# Altium footprint library ADP32F03XQP80S-REV1.01.PcbLib: 6 footprints
Each footprint in its own frame and in the unit in brackets; x right, y up, seen from the top. Pads: shape width x height; smd on the part's side, far side on the other; paste and mask are expansions set on the pad; w line width, h text height; cw(c..) or ccw(c..) is an arc to the next point about the centre after c.
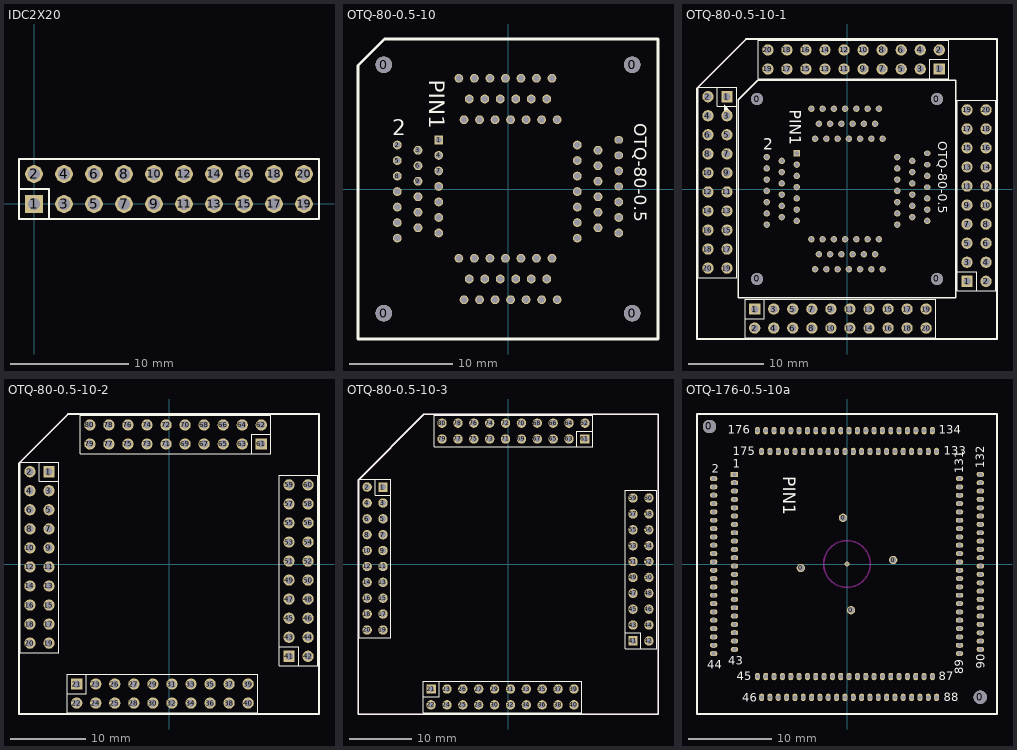
[diagram p0: the footprints below, top view; thin cyan lines are the x and y axes]

## IDC2X20 [mm] "2.54X40P双排插针"
pads (20):
  rect 1.5x1.5 hole 1: 1(0,0)
  round 1.5 hole 1: 2(0,2.54) 3(2.54,0) 4(2.54,2.54) 5(5.08,0) 6(5.08,2.54) 7(7.62,0) 8(7.62,2.54) 9(10.16,0) 10(10.16,2.54) 11(12.7,0) 12(12.7,2.54) 13(15.24,0) 14(15.24,2.54) 15(17.78,0) 16(17.78,2.54) 17(20.32,0) 18(20.32,2.54) 19(22.86,0) 20(22.86,2.54)
Top Overlay:
  lines w0.15: -1.27,1.27 1.27,1.27 1.27,-1.27 ; -1.27,-1.27 24.13,-1.27 24.13,3.81 -1.27,3.81 -1.27,-1.27

## OTQ-80-0.5-10 [mm]
height 0.9
pads (84):
  round 1.6 hole 1.6: 0(-12,-12) 0(-12,12) 0(12,-12) 0(12,12)
  rect 0.854x0.854 hole 0.6: 1(-6.7,4.75)
  round 0.854 hole 0.6: 2(-10.7,4.25) 3(-8.7,3.75) 4(-6.7,3.25) 5(-10.7,2.75) 6(-8.7,2.25) 7(-6.7,1.75) 8(-10.7,1.25) 9(-8.7,0.75) 10(-6.7,0.25) 11(-10.7,-0.25) 12(-8.7,-0.75) 13(-6.7,-1.25) 14(-10.7,-1.75) 15(-8.7,-2.25) 16(-6.7,-2.75) 17(-10.7,-3.25) 18(-8.7,-3.75) 19(-6.7,-4.25) 20(-10.7,-4.75) 21(-4.75,-6.7) 22(-4.25,-10.7) 23(-3.75,-8.7) 24(-3.25,-6.7) 25(-2.75,-10.7) 26(-2.25,-8.7) 27(-1.75,-6.7) 28(-1.25,-10.7) 29(-0.75,-8.7) 30(-0.25,-6.7) 31(0.25,-10.7) 32(0.75,-8.7) 33(1.25,-6.7) 34(1.75,-10.7) 35(2.25,-8.7) 36(2.75,-6.7) 37(3.25,-10.7) 38(3.75,-8.7) 39(4.25,-6.7) 40(4.75,-10.7) 41(6.7,-4.75) 42(10.7,-4.25) 43(8.7,-3.75) 44(6.7,-3.25) 45(10.7,-2.75) 46(8.7,-2.25) 47(6.7,-1.75) 48(10.7,-1.25) 49(8.7,-0.75) 50(6.7,-0.25) 52(8.7,0.75) 53(6.7,1.25) 54(10.7,1.75) 55(8.7,2.25) 56(6.7,2.75) 58(8.7,3.75) 59(6.7,4.25) 61(4.75,6.7) 62(4.25,10.7) 63(3.75,8.7) 64(3.25,6.7) 65(2.75,10.7) 66(2.25,8.7) 67(1.75,6.7) 68(1.25,10.7) 69(0.75,8.7) 70(0.25,6.7) 71(-0.25,10.7) 72(-0.75,8.7) 73(-1.25,6.7) 74(-1.75,10.7) 75(-2.25,8.7) 76(-2.75,6.7) 77(-3.25,10.7) 78(-3.75,8.7) 79(-4.25,6.7) 80(-4.75,10.7)
  oval 0.854x0.75 hole 0.6: 51(10.7,0.25) 57(10.7,3.25) 60(10.7,4.75)
Top Overlay:
  lines w0.254: -14.5,-14.5 -14.5,11.916 -11.916,14.5 14.5,14.5 14.5,-14.5 -14.5,-14.5
  text "OTQ-80-0.5" at 12.192,6.35 h1.2
  text "PIN1" at -7.62,10.541 h1.5
  text "2" at -11.176,5.207 h1.5

## OTQ-80-0.5-10-1 [mm]
height 0.9
pads (164):
  round 1.6 hole 1.6: 0(-12,-12) 0(-12,12) 0(12,-12) 0(12,12)
  rect 1.5x1.5 hole 1: 1(-16,12.308) 1(-12.308,-16) 1(12.308,16) 1(16,-12.308)
  rect 0.854x0.854 hole 0.6: 1(-6.7,4.75)
  round 1.5 hole 1: 2(-18.54,12.308) 2(-12.308,-18.54) 2(12.308,18.54) 2(18.54,-12.308) 3(-16,9.768) 3(-9.768,-16) 3(9.768,16) 3(16,-9.768) 4(-18.54,9.768) 4(-9.768,-18.54) 4(9.768,18.54) 4(18.54,-9.768) 5(-16,7.228) 5(-7.228,-16) 5(7.228,16) 5(16,-7.228) 6(-18.54,7.228) 6(-7.228,-18.54) 6(7.228,18.54) 6(18.54,-7.228) 7(-16,4.688) 7(-4.688,-16) 7(4.688,16) 7(16,-4.688) 8(-18.54,4.688) 8(-4.688,-18.54) 8(4.688,18.54) 8(18.54,-4.688) 9(-16,2.148) 9(-2.148,-16) 9(2.148,16) 9(16,-2.148) 10(-18.54,2.148) 10(-2.148,-18.54) 10(2.148,18.54) 10(18.54,-2.148) 11(-16,-0.392) 11(-0.392,16) 11(0.392,-16) 11(16,0.392) 12(-18.54,-0.392) 12(-0.392,18.54) 12(0.392,-18.54) 12(18.54,0.392) 13(-16,-2.932) 13(-2.932,16) 13(2.932,-16) 13(16,2.932) 14(-18.54,-2.932) 14(-2.932,18.54) 14(2.932,-18.54) 14(18.54,2.932) 15(-16,-5.472) 15(-5.472,16) 15(5.472,-16) 15(16,5.472) 16(-18.54,-5.472) 16(-5.472,18.54) 16(5.472,-18.54) 16(18.54,5.472) 17(-16,-8.012) 17(-8.012,16) 17(8.012,-16) 17(16,8.012) 18(-18.54,-8.012) 18(-8.012,18.54) 18(8.012,-18.54) 18(18.54,8.012) 19(-16,-10.552) 19(-10.552,16) 19(10.552,-16) 19(16,10.552) 20(-18.54,-10.552) 20(-10.552,18.54) 20(10.552,-18.54) 20(18.54,10.552)
  round 0.854 hole 0.6: 2(-10.7,4.25) 3(-8.7,3.75) 4(-6.7,3.25) 5(-10.7,2.75) 6(-8.7,2.25) 7(-6.7,1.75) 8(-10.7,1.25) 9(-8.7,0.75) 10(-6.7,0.25) 11(-10.7,-0.25) 12(-8.7,-0.75) 13(-6.7,-1.25) 14(-10.7,-1.75) 15(-8.7,-2.25) 16(-6.7,-2.75) 17(-10.7,-3.25) 18(-8.7,-3.75) 19(-6.7,-4.25) 20(-10.7,-4.75) 21(-4.75,-6.7) 22(-4.25,-10.7) 23(-3.75,-8.7) 24(-3.25,-6.7) 25(-2.75,-10.7) 26(-2.25,-8.7) 27(-1.75,-6.7) 28(-1.25,-10.7) 29(-0.75,-8.7) 30(-0.25,-6.7) 31(0.25,-10.7) 32(0.75,-8.7) 33(1.25,-6.7) 34(1.75,-10.7) 35(2.25,-8.7) 36(2.75,-6.7) 37(3.25,-10.7) 38(3.75,-8.7) 39(4.25,-6.7) 40(4.75,-10.7) 41(6.7,-4.75) 42(10.7,-4.25) 43(8.7,-3.75) 44(6.7,-3.25) 45(10.7,-2.75) 46(8.7,-2.25) 47(6.7,-1.75) 48(10.7,-1.25) 49(8.7,-0.75) 50(6.7,-0.25) 52(8.7,0.75) 53(6.7,1.25) 54(10.7,1.75) 55(8.7,2.25) 56(6.7,2.75) 58(8.7,3.75) 59(6.7,4.25) 61(4.75,6.7) 62(4.25,10.7) 63(3.75,8.7) 64(3.25,6.7) 65(2.75,10.7) 66(2.25,8.7) 67(1.75,6.7) 68(1.25,10.7) 69(0.75,8.7) 70(0.25,6.7) 71(-0.25,10.7) 72(-0.75,8.7) 73(-1.25,6.7) 74(-1.75,10.7) 75(-2.25,8.7) 76(-2.75,6.7) 77(-3.25,10.7) 78(-3.75,8.7) 79(-4.25,6.7) 80(-4.75,10.7)
  oval 0.854x0.75 hole 0.6: 51(10.7,0.25) 57(10.7,3.25) 60(10.7,4.75)
Top Overlay:
  region: -16.383,9.12 -15.343,10.16 -16.383,11.2
  lines w0.15: -17.27,13.578 -17.27,11.038 -14.73,11.038 ; -13.578,-17.27 -11.038,-17.27 -11.038,-14.73 ; 11.038,14.73 11.038,17.27 13.578,17.27 ; 14.73,-11.038 17.27,-11.038 17.27,-13.578 ; -19.81,-11.822 -14.73,-11.822 -14.73,13.578 -19.81,13.578 -19.81,-11.822 ; -13.578,-19.81 11.822,-19.81 11.822,-14.73 -13.578,-14.73 -13.578,-19.81 ; -11.822,14.73 -11.822,19.81 13.578,19.81 13.578,14.73 -11.822,14.73 ; 14.73,-13.578 14.73,11.822 19.81,11.822 19.81,-13.578 14.73,-13.578
  lines w0.254: -14.5,-14.5 14.5,-14.5 14.5,14.5 -11.916,14.5 -14.5,11.916 -14.5,-14.5
  text "2" at -11.176,5.207 h1.5
  text "PIN1" at -7.62,10.541 h1.5
  text "OTQ-80-0.5" at 12.192,6.35 h1.2
Top Overlay keep-out:
  lines w0.203: -13.467,19.967 -20,13.433 -20,-20 20,-20 20,20 -13.467,20

## OTQ-80-0.5-10-2 [mm]
height 0.9
pads (80):
  rect 1.5x1.5 hole 1: 1(-16,12.308) 21(-12.308,-16) 41(16,-12.308) 61(12.308,16)
  round 1.5 hole 1: 2(-18.54,12.308) 3(-16,9.768) 4(-18.54,9.768) 5(-16,7.228) 6(-18.54,7.228) 7(-16,4.688) 8(-18.54,4.688) 9(-16,2.148) 10(-18.54,2.148) 11(-16,-0.392) 12(-18.54,-0.392) 13(-16,-2.932) 14(-18.54,-2.932) 15(-16,-5.472) 16(-18.54,-5.472) 17(-16,-8.012) 18(-18.54,-8.012) 19(-16,-10.552) 20(-18.54,-10.552) 22(-12.308,-18.54) 23(-9.768,-16) 24(-9.768,-18.54) 25(-7.228,-18.54) 26(-7.228,-16) 27(-4.688,-16) 28(-4.688,-18.54) 29(-2.148,-16) 30(-2.148,-18.54) 31(0.392,-16) 32(0.392,-18.54) 33(2.932,-16) 34(2.932,-18.54) 35(5.472,-16) 36(5.472,-18.54) 37(8.012,-16) 38(8.012,-18.54) 39(10.552,-16) 40(10.552,-18.54) 42(18.54,-12.308) 43(16,-9.768) 44(18.54,-9.768) 45(16,-7.228) 46(18.54,-7.228) 47(16,-4.688) 48(18.54,-4.688) 49(16,-2.148) 50(18.54,-2.148) 51(16,0.392) 52(18.54,0.392) 53(16,2.932) 54(18.54,2.932) 55(16,5.472) 56(18.54,5.472) 57(16,8.012) 58(18.54,8.012) 59(16,10.552) 60(18.54,10.552) 62(12.308,18.54) 63(9.768,16) 64(9.768,18.54) 65(7.228,16) 66(7.228,18.54) 67(4.688,16) 68(4.688,18.54) 69(2.148,16) 70(2.148,18.54) 71(-0.392,16) 72(-0.392,18.54) 73(-2.932,16) 74(-2.932,18.54) 75(-5.472,16) 76(-5.472,18.54) 77(-8.012,16) 78(-8.012,18.54) 79(-10.552,16) 80(-10.552,18.54)
Top Overlay:
  lines w0.15: -17.27,13.578 -17.27,11.038 -14.73,11.038 ; -13.578,-17.27 -11.038,-17.27 -11.038,-14.73 ; 11.038,14.73 11.038,17.27 13.578,17.27 ; 14.73,-11.038 17.27,-11.038 17.27,-13.578 ; -19.81,-11.822 -19.81,13.578 -14.73,13.578 -14.73,-11.822 -19.81,-11.822 ; -13.578,-19.81 -13.578,-14.73 11.822,-14.73 11.822,-19.81 -13.578,-19.81 ; -11.822,14.73 13.578,14.73 13.578,19.81 -11.822,19.81 -11.822,14.73 ; 14.73,-13.578 19.81,-13.578 19.81,11.822 14.73,11.822 14.73,-13.578
Top Overlay keep-out:
  lines w0.203: -13.467,19.967 -20,13.433 -20,-20 20,-20 20,20 -13.467,20

## OTQ-80-0.5-10-3 [mm]
height 0.9
pads (80):
  rect 1.5x1.5 hole 1: 1(-20,12.308) 21(-12.308,-20) 41(20,-12.308) 61(12.308,20)
  round 1.5 hole 1: 2(-22.54,12.308) 3(-20,9.768) 4(-22.54,9.768) 5(-20,7.228) 6(-22.54,7.228) 7(-20,4.688) 8(-22.54,4.688) 9(-20,2.148) 10(-22.54,2.148) 11(-20,-0.392) 12(-22.54,-0.392) 13(-20,-2.932) 14(-22.54,-2.932) 15(-20,-5.472) 16(-22.54,-5.472) 17(-20,-8.012) 18(-22.54,-8.012) 19(-20,-10.552) 20(-22.54,-10.552) 22(-12.308,-22.54) 23(-9.768,-20) 24(-9.768,-22.54) 25(-7.228,-22.54) 26(-7.228,-20) 27(-4.688,-20) 28(-4.688,-22.54) 29(-2.148,-20) 30(-2.148,-22.54) 31(0.392,-20) 32(0.392,-22.54) 33(2.932,-20) 34(2.932,-22.54) 35(5.472,-20) 36(5.472,-22.54) 37(8.012,-20) 38(8.012,-22.54) 39(10.552,-20) 40(10.552,-22.54) 42(22.54,-12.308) 43(20,-9.768) 44(22.54,-9.768) 45(20,-7.228) 46(22.54,-7.228) 47(20,-4.688) 48(22.54,-4.688) 49(20,-2.148) 50(22.54,-2.148) 51(20,0.392) 52(22.54,0.392) 53(20,2.932) 54(22.54,2.932) 55(20,5.472) 56(22.54,5.472) 57(20,8.012) 58(22.54,8.012) 59(20,10.552) 60(22.54,10.552) 62(12.308,22.54) 63(9.768,20) 64(9.768,22.54) 65(7.228,20) 66(7.228,22.54) 67(4.688,20) 68(4.688,22.54) 69(2.148,20) 70(2.148,22.54) 71(-0.392,20) 72(-0.392,22.54) 73(-2.932,20) 74(-2.932,22.54) 75(-5.472,20) 76(-5.472,22.54) 77(-8.012,20) 78(-8.012,22.54) 79(-10.552,20) 80(-10.552,22.54)
Top Overlay:
  lines w0.15: -21.27,13.578 -21.27,11.038 -18.73,11.038 ; -13.578,-21.27 -11.038,-21.27 -11.038,-18.73 ; 11.038,18.73 11.038,21.27 13.578,21.27 ; 18.73,-11.038 21.27,-11.038 21.27,-13.578 ; -23.81,-11.822 -23.81,13.578 -18.73,13.578 -18.73,-11.822 -23.81,-11.822 ; -13.578,-23.81 -13.578,-18.73 11.822,-18.73 11.822,-23.81 -13.578,-23.81 ; -11.822,18.73 13.578,18.73 13.578,23.81 -11.822,23.81 -11.822,18.73 ; 18.73,-13.578 23.81,-13.578 23.81,11.822 18.73,11.822 18.73,-13.578
Top Overlay keep-out:
  lines w0.203: -13.467,24 24,24 24,-24 -24,-24 -24,13.433 -13.446,23.987

## OTQ-176-0.5-10a [mm]
height 0.9
pads (182):
  round 1.6 hole 1.6: 0(-16.5,16.5) 0(16,-16)
  round 1 hole 0.7: 0(-5.54,-0.48) 0(-0.48,5.54) 0(0.48,-5.54) 0(5.54,0.48)
  rect 0.9x0.6 hole 0.5: 1(-13.5,10.75)
  oval 0.9x0.6 hole 0.5: 2(-16,10.25) 3(-13.5,9.75) 4(-16,9.25) 5(-13.5,8.75) 6(-16,8.25) 7(-13.5,7.75) 8(-16,7.25) 9(-13.5,6.75) 10(-16,6.25) 11(-13.5,5.75) 12(-16,5.25) 13(-13.5,4.75) 14(-16,4.25) 15(-13.5,3.75) 16(-16,3.25) 17(-13.5,2.75) 18(-16,2.25) 19(-13.5,1.75) 20(-16,1.25) 21(-13.5,0.75) 22(-16,0.25) 23(-13.5,-0.25) 24(-16,-0.75) 25(-13.5,-1.25) 26(-16,-1.75) 27(-13.5,-2.25) 28(-16,-2.75) 29(-13.5,-3.25) 30(-16,-3.75) 31(-13.5,-4.25) 32(-16,-4.75) 33(-13.5,-5.25) 34(-16,-5.75) 35(-13.5,-6.25) 36(-16,-6.75) 37(-13.5,-7.25) 38(-16,-7.75) 39(-13.5,-8.25) 40(-16,-8.75) 41(-13.5,-9.25) 42(-16,-9.75) 43(-13.5,-10.25) 44(-16,-10.75) 89(13.5,-10.75) 90(16,-10.25) 91(13.5,-9.75) 92(16,-9.25) 93(13.5,-8.75) 94(16,-8.25) 95(13.5,-7.75) 96(16,-7.25) 97(13.5,-6.75) 98(16,-6.25) 99(13.5,-5.75) 100(16,-5.25) 101(13.5,-4.75) 102(16,-4.25) 103(13.5,-3.75) 104(16,-3.25) 105(13.5,-2.75) 106(16,-2.25) 107(13.5,-1.75) 108(16,-1.25) 109(13.5,-0.75) 110(16,-0.25) 111(13.5,0.25) 112(16,0.75) 113(13.5,1.25) 114(16,1.75) 115(13.5,2.25) 116(16,2.75) 117(13.5,3.25) 118(16,3.75) 119(13.5,4.25) 120(16,4.75) 121(13.5,5.25) 122(16,5.75) 123(13.5,6.25) 124(16,6.75) 125(13.5,7.25) 126(16,7.75) 127(13.5,8.25) 128(16,8.75) 129(13.5,9.25) 130(16,9.75) 131(13.5,10.25) 132(16,10.75)
  oval 0.6x0.9 hole 0.5: 45(-10.75,-13.5) 46(-10.25,-16) 47(-9.75,-13.5) 48(-9.25,-16) 49(-8.75,-13.5) 50(-8.25,-16) 51(-7.75,-13.5) 52(-7.25,-16) 53(-6.75,-13.5) 54(-6.25,-16) 55(-5.75,-13.5) 56(-5.25,-16) 57(-4.75,-13.5) 58(-4.25,-16) 59(-3.75,-13.5) 60(-3.25,-16) 61(-2.75,-13.5) 62(-2.25,-16) 63(-1.75,-13.5) 64(-1.25,-16) 65(-0.75,-13.5) 66(-0.25,-16) 67(0.25,-13.5) 68(0.75,-16) 69(1.25,-13.5) 70(1.75,-16) 71(2.25,-13.5) 72(2.75,-16) 73(3.25,-13.5) 74(3.75,-16) 75(4.25,-13.5) 76(4.75,-16) 77(5.25,-13.5) 78(5.75,-16) 79(6.25,-13.5) 80(6.75,-16) 81(7.25,-13.5) 82(7.75,-16) 83(8.25,-13.5) 84(8.75,-16) 85(9.25,-13.5) 86(9.75,-16) 87(10.25,-13.5) 88(10.75,-16) 133(10.75,13.5) 134(10.25,16) 135(9.75,13.5) 136(9.25,16) 137(8.75,13.5) 138(8.25,16) 139(7.75,13.5) 140(7.25,16) 141(6.75,13.5) 142(6.25,16) 143(5.75,13.5) 144(5.25,16) 145(4.75,13.5) 146(4.25,16) 147(3.75,13.5) 148(3.25,16) 149(2.75,13.5) 150(2.25,16) 151(1.75,13.5) 152(1.25,16) 153(0.75,13.5) 154(0.25,16) 155(-0.25,13.5) 156(-0.75,16) 157(-1.25,13.5) 158(-1.75,16) 159(-2.25,13.5) 160(-2.75,16) 161(-3.25,13.5) 162(-3.75,16) 163(-4.25,13.5) 164(-4.75,16) 165(-5.25,13.5) 166(-5.75,16) 167(-6.25,13.5) 168(-6.75,16) 169(-7.25,13.5) 170(-7.75,16) 171(-8.25,13.5) 172(-8.75,16) 173(-9.25,13.5) 174(-9.75,16) 175(-10.25,13.5) 176(-10.75,16)
via 0,0 diameter 0.6 hole 0.4
Top Overlay:
  lines w0.254: -18,-18 -18,18 18,18 18,-18 -18,-18
  text "175" at -13.693,13.074 h1
  text "176" at -14.328,15.614 h1
  text "44" at -16.764,-12.573 h1
  text "43" at -14.224,-12.065 h1
  text "134" at 11.004,15.659 h1
  text "133" at 11.639,13.119 h1
  text "131" at 13.932,10.877 h1
  text "132" at 16.472,11.512 h1
  text "89" at 13.97,-13.208 h1
  text "90" at 16.51,-12.573 h1
  text "87" at 11.004,-13.932 h1
  text "88" at 11.639,-16.472 h1
  text "46" at -12.573,-16.51 h1
  text "45" at -13.208,-13.97 h1
  text "1" at -13.716,11.557 h1
  text "PIN1" at -7.62,10.541 h1.5
  text "2" at -16.256,10.922 h1
Keep-Out Layer:
  circle w0.2: c0,0 r2.8